# Altium footprint library turn-signal-indicator.PcbLib: 7 footprints
Each footprint in its own frame and in the unit in brackets; x right, y up, seen from the top. Pads: shape width x height; smd on the part's side, far side on the other; paste and mask are expansions set on the pad; w line width, h text height; cw(c..) or ccw(c..) is an arc to the next point about the centre after c.
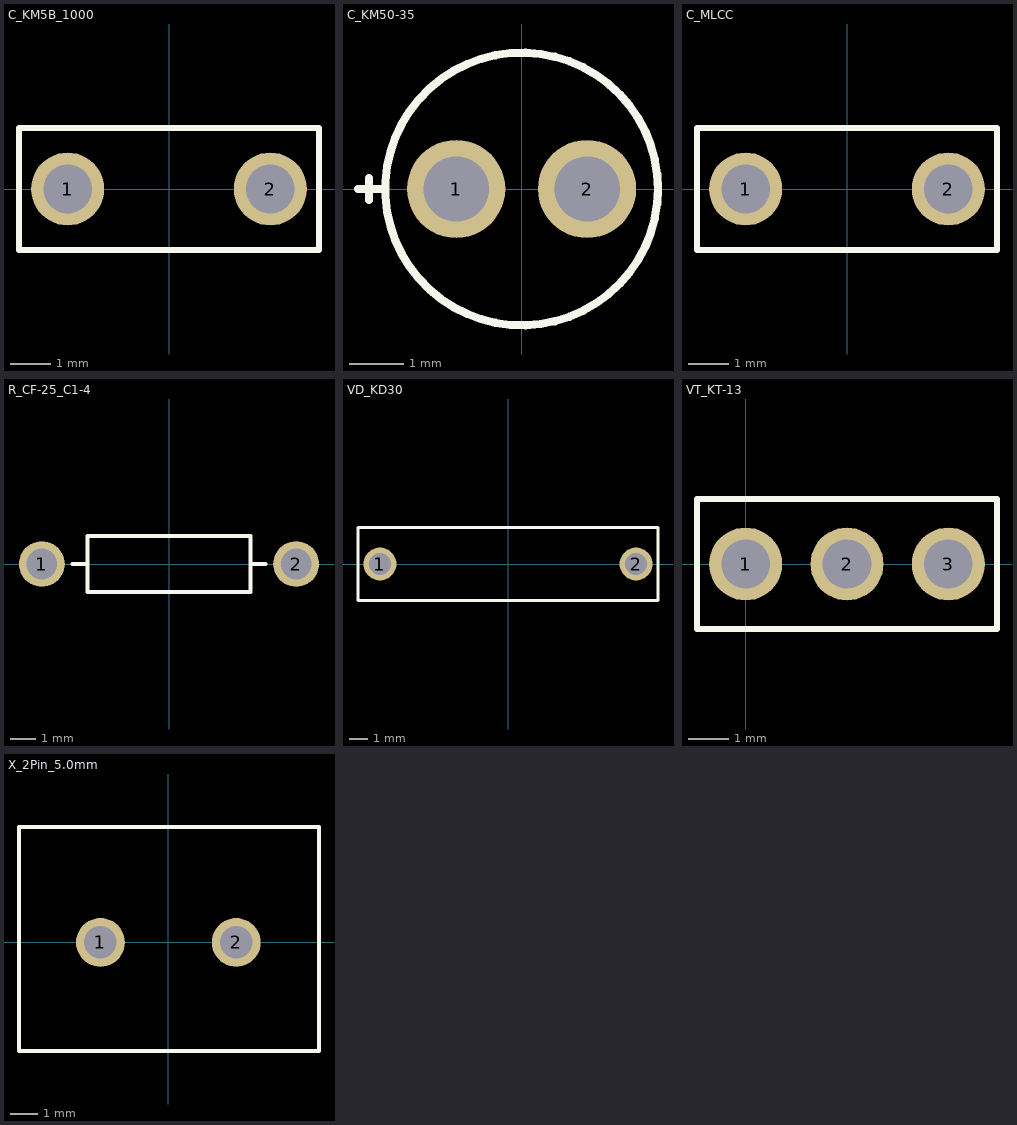
[diagram p0: the footprints below, top view; thin cyan lines are the x and y axes]

## C_KM5B_1000 [mm] "PCB footprint for KM5B capacitor"
pads (2):
  round 1.8 hole 1.2: 1(-2.5,0) 2(2.5,0)
Top Overlay:
  lines w0.15: -3.7,-1.5 -3.7,1.5 3.7,1.5 3.7,-1.5 -3.7,-1.5
3D body "820pf MLCC Ceramic Capacitor.SLDPRT": height 7.5, standoff -7, extent -2.788,-1.251 2.788,1.251

## C_KM50-35 [mm] "PCB footprint for KM50-35 capacitor"
pads (2):
  round 1.8 hole 1.2: 1(-1.2,0) 2(1.2,0)
Top Overlay:
  circle w0.15: c0,0 r2.5
  lines w0.15: -3,0 -2.5,0 ; -2.8,-0.2 -2.8,0.2
3D body "Elco 10uF-35V (5 x 11 mm).STEP": height 13.05, standoff -18.15, extent -2.55,-2.545 2.546,2.55

## C_MLCC [mm] "Multilayer ceramic capacitor footprint"
pads (2):
  round 1.8 hole 1.2: 1(-2.5,0) 2(2.5,0)
Top Overlay:
  lines w0.15: -3.7,-1.5 3.7,-1.5 3.7,1.5 -3.7,1.5 -3.7,-1.5
3D body "330pF MLCC Ceramic Capacitor.SLDPRT": height 7.5, standoff -7, extent -2.788,-1.251 2.788,1.251

## R_CF-25_C1-4 [mm] "PCB footprint for CF-25 / C1-4 resistor"
pads (2):
  round 1.8 hole 1.2: 1(-5,0) 2(5,0)
Top Overlay:
  lines w0.15: -3.8,0 -3.2,0 ; 3.2,0 3.8,0 ; -3.2,-1.1 0,-1.1 3.2,-1.1 3.2,1.1 -3.2,1.1 -3.2,-1.1
3D body "2.7R 0.4.STEP": height 2.93, standoff -2.54, extent -5.47,-1.156 5.3,1.156

## VD_KD30 [mm] "Diode footprint, KD-30 package"
pads (2):
  round 1.8 hole 1.2: 1(-7,0) 2(7,0)
Top Overlay:
  lines w0.15: -8.2,-2 -8.2,2 8.2,2 8.2,-2 -8.2,-2
3D body "User Library-KD29-C.STEP": height 5.82, standoff -1, extent -7.675,-1.818 7.675,1.818

## VT_KT-13 [mm]
pads (3):
  round 1.8 hole 1.2: 1(0,0) 2(2.5,0) 3(5,0)
Top Overlay:
  lines w0.15: -1.2,-1.6 -1.2,1.6 6.2,1.6 6.2,-1.6 -1.2,-1.6
3D body "KT-13_1.STEP": height 9, standoff -2, extent -1.1,-1.5 6.1,1.5

## X_2Pin_5.0mm [mm] "2-pin connector footprint"
pads (2):
  round 1.8 hole 1.2: 1(-2.5,0) 2(2.5,0)
Top Overlay:
  lines w0.15: -5.5,-4 5.55,-4 5.55,4.25 -5.5,4.25 -5.5,-4
3D body "KF301-5-2P_blue.step": height 10.46, standoff -3.7, extent -5.15,-3.7 5.2,3.9